# Altium footprint library Robert_.PcbLib: 95 footprints (part 4 of 6)
Each footprint in its own frame and in the unit in brackets; x right, y up, seen from the top. Pads: shape width x height; smd on the part's side, far side on the other; paste and mask are expansions set on the pad; w line width, h text height; cw(c..) or ccw(c..) is an arc to the next point about the centre after c.
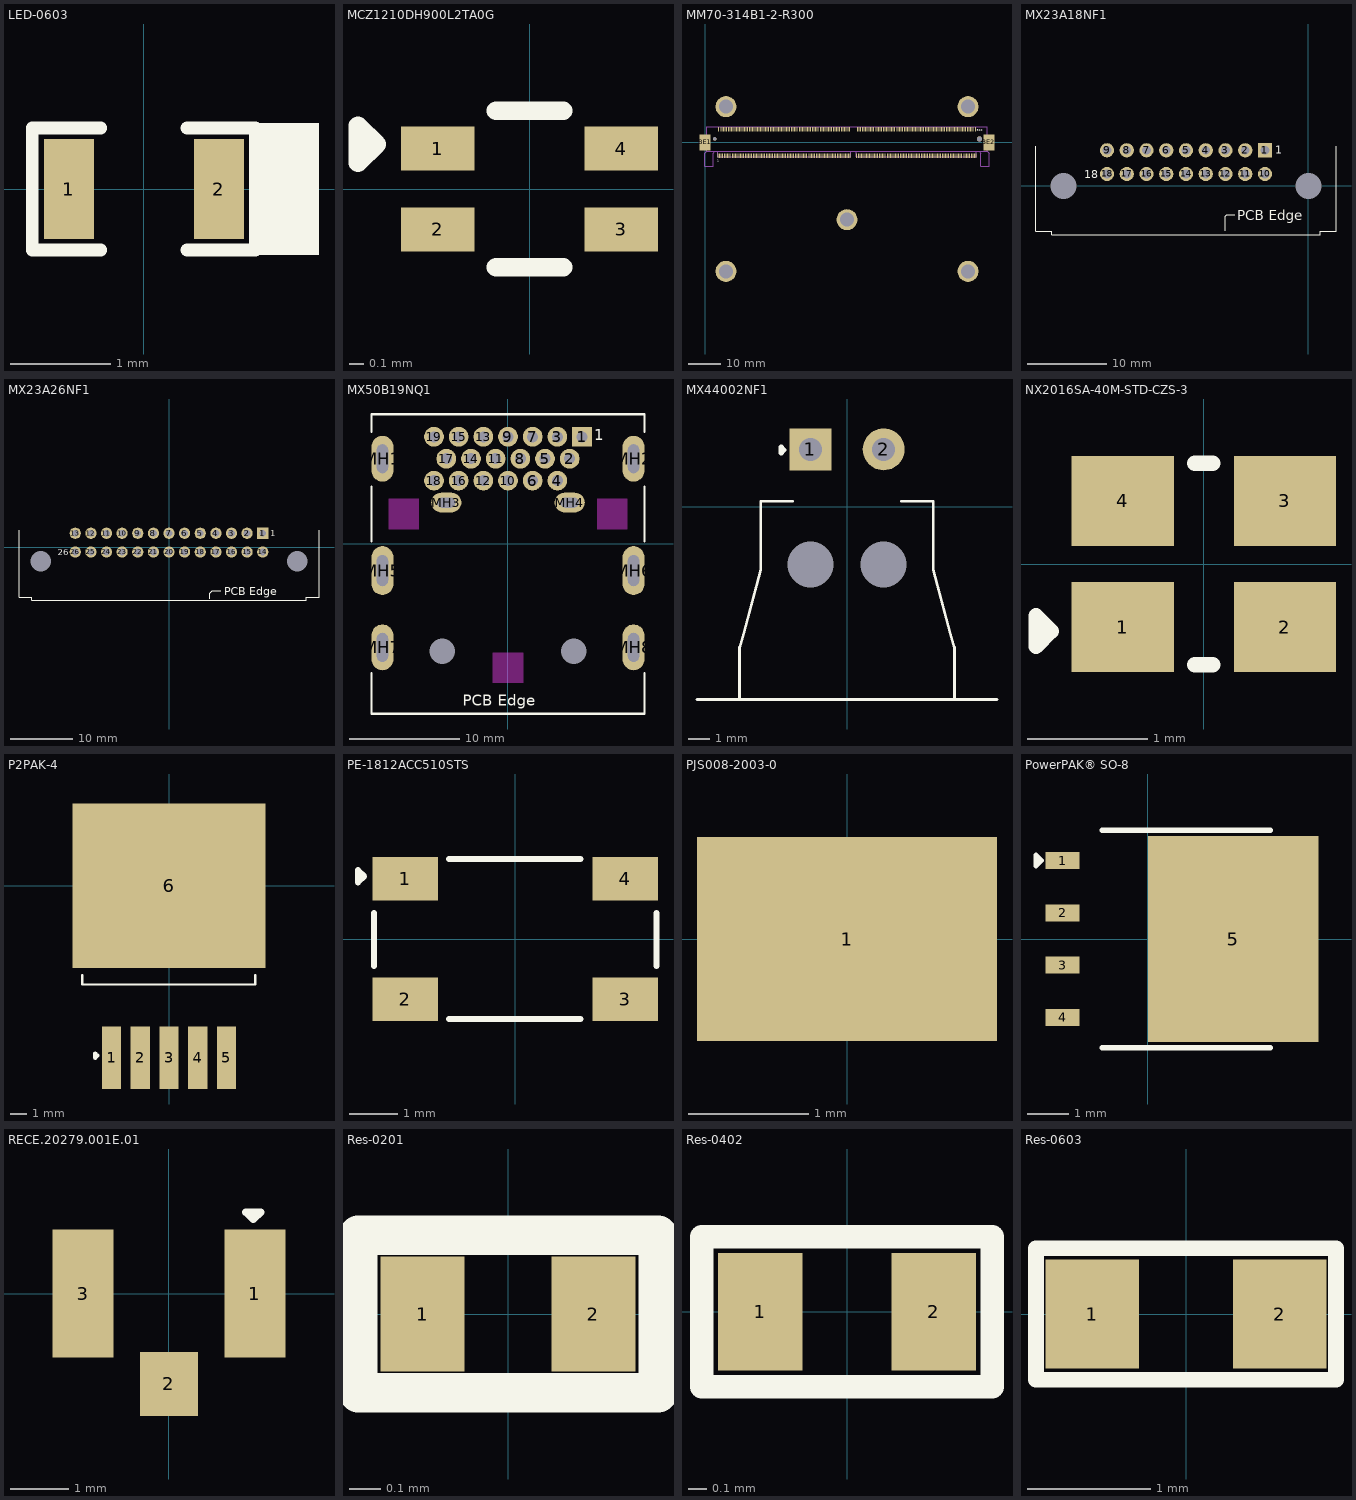
[diagram p3: the footprints below, top view; thin cyan lines are the x and y axes]

## LED-0603 [mm]
pads (2):
  rect 0.5x1 smd: 1(-0.75,0) 2(0.75,0)
Top Overlay:
  rectangle: 1.118,-0.66 1.753,0.66
  lines w0.127: -0.432,-0.61 -1.118,-0.61 -1.118,0.61 -0.432,0.61 ; 0.432,-0.61 1.118,-0.61 1.118,0.61 0.432,0.61
3D body "User Library-LED SMD0603.step": height 0.68, standoff 0, extent -0.825,-0.369 0.825,0.356

## MCZ1210DH900L2TA0G [mm]
pads (4):
  rect 0.5x0.3 smd: 1(-0.625,0.275) 2(-0.625,-0.275) 3(0.625,-0.275) 4(0.625,0.275)
Top Overlay:
  lines w0.127: -0.229,-0.533 0.229,-0.533 ; -0.229,0.533 0.229,0.533 ; -1.168,0.178 -1.168,0.432 -1.041,0.305 -1.168,0.178
3D body "MCZ1210DH900L2TA0G_TDK.step": height 0.51, standoff 0, extent -0.625,-0.495 0.625,0.495

## MM70-314B1-2-R300 [mm]
pads (323):
  rect 0.3x1.5 smd: 1(3.95,-4.1) 2(4.2,4.1) 3(4.45,-4.1) 4(4.7,4.1) 5(4.95,-4.1) 6(5.2,4.1) 7(5.45,-4.1) 8(5.7,4.1) 9(5.95,-4.1) 10(6.2,4.1) 11(6.45,-4.1) 12(6.7,4.1) 13(6.95,-4.1) 14(7.2,4.1) 15(7.45,-4.1) 16(7.7,4.1) 17(7.95,-4.1) 18(8.2,4.1) 19(8.45,-4.1) 20(8.7,4.1) 21(8.95,-4.1) 22(9.2,4.1) 23(9.45,-4.1) 24(9.7,4.1) 25(9.95,-4.1) 26(10.2,4.1) 27(10.45,-4.1) 28(10.7,4.1) 29(10.95,-4.1) 30(11.2,4.1) 31(11.45,-4.1) 32(11.7,4.1) 33(11.95,-4.1) 34(12.2,4.1) 35(12.45,-4.1) 36(12.7,4.1) 37(12.95,-4.1) 38(13.2,4.1) 39(13.45,-4.1) 40(13.7,4.1) 41(13.95,-4.1) 42(14.2,4.1) 43(14.45,-4.1) 44(14.7,4.1) 45(14.95,-4.1) 46(15.2,4.1) 47(15.45,-4.1) 48(15.7,4.1) 49(15.95,-4.1) 50(16.2,4.1) 51(16.45,-4.1) 52(16.7,4.1) 53(16.95,-4.1) 54(17.2,4.1) 55(17.45,-4.1) 56(17.7,4.1) 57(17.95,-4.1) 58(18.2,4.1) 59(18.45,-4.1) 60(18.7,4.1) 61(18.95,-4.1) 62(19.2,4.1) 63(19.45,-4.1) 64(19.7,4.1) 65(19.95,-4.1) 66(20.2,4.1) 67(20.45,-4.1) 68(20.7,4.1) 69(20.95,-4.1) 70(21.2,4.1) 71(21.45,-4.1) 72(21.7,4.1) 73(21.95,-4.1) 74(22.2,4.1) 75(22.45,-4.1) 76(22.7,4.1) 77(22.95,-4.1) 78(23.2,4.1) 79(23.45,-4.1) 80(23.7,4.1) 81(23.95,-4.1) 82(24.2,4.1) 83(24.45,-4.1) 84(24.7,4.1) 85(24.95,-4.1) 86(25.2,4.1) 87(25.45,-4.1) 88(25.7,4.1) 89(25.95,-4.1) 90(26.2,4.1) 91(26.45,-4.1) 92(26.7,4.1) 93(26.95,-4.1) 94(27.2,4.1) 95(27.45,-4.1) 96(27.7,4.1) 97(27.95,-4.1) 98(28.2,4.1) 99(28.45,-4.1) 100(28.7,4.1) 101(28.95,-4.1) 102(29.2,4.1) 103(29.45,-4.1) 104(29.7,4.1) 105(29.95,-4.1) 106(30.2,4.1) 107(30.45,-4.1) 108(30.7,4.1) 109(30.95,-4.1) 110(31.2,4.1) 111(31.45,-4.1) 112(31.7,4.1) 113(31.95,-4.1) 114(32.2,4.1) 115(32.45,-4.1) 116(32.7,4.1) 117(32.95,-4.1) 118(33.2,4.1) 119(33.45,-4.1) 120(33.7,4.1) 121(33.95,-4.1) 122(34.2,4.1) 123(34.45,-4.1) 124(34.7,4.1) 125(34.95,-4.1) 126(35.2,4.1) 127(35.45,-4.1) 128(35.7,4.1) 129(35.95,-4.1) 130(36.2,4.1) 131(36.45,-4.1) 132(36.7,4.1) 133(36.95,-4.1) 134(37.2,4.1) 135(37.45,-4.1) 136(37.7,4.1) 137(37.95,-4.1) 138(38.2,4.1) 139(38.45,-4.1) 140(38.7,4.1) 141(38.95,-4.1) 142(39.2,4.1) 143(39.45,-4.1) 144(39.7,4.1) 145(39.95,-4.1) 146(40.2,4.1) 147(40.45,-4.1) 148(40.7,4.1) 149(40.95,-4.1) 150(41.2,4.1) 151(41.45,-4.1) 152(41.7,4.1) 153(41.95,-4.1) 154(42.2,4.1) 155(42.45,-4.1) 156(42.7,4.1) 157(42.95,-4.1) 158(43.2,4.1) 159(43.45,-4.1) 160(43.7,4.1) 161(43.95,-4.1) 162(44.2,4.1) 163(44.45,-4.1) 164(44.7,4.1) 165(44.95,-4.1) 173(46.95,-4.1) 174(47.2,4.1) 175(47.45,-4.1) 176(47.7,4.1) 177(47.95,-4.1) 178(48.2,4.1) 179(48.45,-4.1) 180(48.7,4.1) 181(48.95,-4.1) 182(49.2,4.1) 183(49.45,-4.1) 184(49.7,4.1) 185(49.95,-4.1) 186(50.2,4.1) 187(50.45,-4.1) 188(50.7,4.1) 189(50.95,-4.1) 190(51.2,4.1) 191(51.45,-4.1) 192(51.7,4.1) 193(51.95,-4.1) 194(52.2,4.1) 195(52.45,-4.1) 196(52.7,4.1) 197(52.95,-4.1) 198(53.2,4.1) 199(53.45,-4.1) 200(53.7,4.1) 201(53.95,-4.1) 202(54.2,4.1) 203(54.45,-4.1) 204(54.7,4.1) 205(54.95,-4.1) 206(55.2,4.1) 207(55.45,-4.1) 208(55.7,4.1) 209(55.95,-4.1) 210(56.2,4.1) 211(56.45,-4.1) 212(56.7,4.1) 213(56.95,-4.1) 214(57.2,4.1) 215(57.45,-4.1) 216(57.7,4.1) 217(57.95,-4.1) 218(58.2,4.1) 219(58.45,-4.1) 220(58.7,4.1) 221(58.95,-4.1) 222(59.2,4.1) 223(59.45,-4.1) 224(59.7,4.1) 225(59.95,-4.1) 226(60.2,4.1) 227(60.45,-4.1) 228(60.7,4.1) 229(60.95,-4.1) 230(61.2,4.1) 231(61.45,-4.1) 232(61.7,4.1) 233(61.95,-4.1) 234(62.2,4.1) 235(62.45,-4.1) 236(62.7,4.1) 237(62.95,-4.1) 238(63.2,4.1) 239(63.45,-4.1) 240(63.7,4.1) 241(63.95,-4.1) 242(64.2,4.1) 243(64.45,-4.1) 244(64.7,4.1) 245(64.95,-4.1) 246(65.2,4.1) 247(65.45,-4.1) 248(65.7,4.1) 249(65.95,-4.1) 250(66.2,4.1) 251(66.45,-4.1) 252(66.7,4.1) 253(66.95,-4.1) 254(67.2,4.1) 255(67.45,-4.1) 256(67.7,4.1) 257(67.95,-4.1) 258(68.2,4.1) 259(68.45,-4.1) 260(68.7,4.1) 261(68.95,-4.1) 262(69.2,4.1) 263(69.45,-4.1) 264(69.7,4.1) 265(69.95,-4.1) 266(70.2,4.1) 267(70.45,-4.1) 268(70.7,4.1) 269(70.95,-4.1) 270(71.2,4.1) 271(71.45,-4.1) 272(71.7,4.1) 273(71.95,-4.1) 274(72.2,4.1) 275(72.45,-4.1) 276(72.7,4.1) 277(72.95,-4.1) 278(73.2,4.1) 279(73.45,-4.1) 280(73.7,4.1) 281(73.95,-4.1) 282(74.2,4.1) 283(74.45,-4.1) 284(74.7,4.1) 285(74.95,-4.1) 286(75.2,4.1) 287(75.45,-4.1) 288(75.7,4.1) 289(75.95,-4.1) 290(76.2,4.1) 291(76.45,-4.1) 292(76.7,4.1) 293(76.95,-4.1) 294(77.2,4.1) 295(77.45,-4.1) 296(77.7,4.1) 297(77.95,-4.1) 298(78.2,4.1) 299(78.45,-4.1) 300(78.7,4.1) 301(78.95,-4.1) 302(79.2,4.1) 303(79.45,-4.1) 304(79.7,4.1) 305(79.95,-4.1) 306(80.2,4.1) 307(80.45,-4.1) 308(80.7,4.1) 309(80.95,-4.1) 310(81.2,4.1) 311(81.45,-4.1) 312(81.7,4.1) 313(81.95,-4.1) 314(82.2,4.1) 315(82.45,-4.1) 316(82.7,4.1) 317(82.95,-4.1) 318(83.2,4.1) 319(83.45,-4.1) 320(83.7,4.1) 321(83.95,-4.1)
  rect 3.3x5 smd: BE1(0,0) BE2(87.9,0)
  round 1.1 hole 1.1 unplated: ""(2.95,1.1)
  round 6.5 hole 4.33: ""(6.45,-39.9) ""(6.45,11.1) ""(43.95,-23.9) ""(81.45,-39.9) ""(81.45,11.1)
  round 1.6 hole 1.6 unplated: ""(84.95,1.1)
Top Overlay:
  text "320" at 84.198,3.553 h0.7
  text "1" at 3.807,-6.023 h0.7
Mechanical 3:
  lines w0.1: 3.05,-2.65 2.55,-3.35 2.55,-7.35 -0.05,-7.35 -0.05,-3.35 0.45,-2.65 ; 3.85,-2.65 3.85,-4.45 45.05,-4.45 45.05,-2.65 ; 46.85,-2.65 46.85,-4.45 84.05,-4.45 84.05,-2.65 ; 84.85,-2.65 85.35,-3.35 85.35,-7.35 87.95,-7.35 87.95,-3.35 87.45,-2.65 ; 0.45,-2.65 0.45,-2 -1,-2 -1,2 0.45,2 0.45,4.85 87.45,4.85 87.45,2 88.9,2 88.9,-2 87.45,-2 87.45,-2.65 ; 0.45,-2.65 87.45,-2.65
3D body "Fastner8mm.STEP": height 8.02, standoff -1.51, extent 3.659,8.332 9.219,13.868
3D body "Fastner8mm.STEP": height 8.02, standoff -1.51, extent 78.659,8.332 84.219,13.868
3D body "Fastner3mm.STEP": height 3.02, standoff -1.51, extent 41.159,-26.668 46.719,-21.132
3D body "Fastner3mm.STEP": height 3.02, standoff -1.51, extent 78.659,-42.668 84.219,-37.132
3D body "Fastner3mm.STEP": height 3.02, standoff -1.51, extent 3.659,-42.668 9.219,-37.132
3D body "SJ121699_MM70-314B1-2_v01_JAE_Proprietary.STEP": height 6.71, standoff -0.99, extent -1,-7.35 88.9,4.85

## MX23A18NF1 [mm]
pads (20):
  rect 1.8x1.8 hole 1.1: 1(-5.5,4.5)
  round 1.8 hole 1.1: 2(-8,4.5) 3(-10.5,4.5) 4(-13,4.5) 5(-15.5,4.5) 6(-18,4.5) 7(-20.5,4.5) 8(-23,4.5) 9(-25.5,4.5) 10(-5.5,1.5) 11(-8,1.5) 12(-10.5,1.5) 13(-13,1.5) 14(-15.5,1.5) 15(-18,1.5) 16(-20.5,1.5) 17(-23,1.5) 18(-25.5,1.5)
  round 0 hole 3.3 unplated: ""(-31,0) ""(0,0)
Top Overlay:
  lines w0.127: -34.5,5 -34.5,-5.733 -32.5,-5.733 -32.5,-6.203 1.499,-6.203 ; -10.541,-5.664 -10.541,-3.861 -10.338,-3.658 -9.347,-3.658 ; 1.5,-6.203 1.5,-5.733 3.5,-5.733 3.5,5
  text "PCB Edge" at -8.992,-4.369 h1.27
  text "1" at -4.166,4.064 h1
  text "18" at -28.372,0.991 h1
3D body "K3D-MX23A18NF1-R5 JAE Connector Division Proprietary.STEP": height 18.45, standoff -2.95, extent -34.495,-33.298 3.505,5.002

## MX23A26NF1 [mm]
pads (28):
  rect 1.8x1.8 hole 1.1: 1(15,2.25)
  round 1.8 hole 1.1: 2(12.5,2.25) 3(10,2.25) 4(7.5,2.25) 5(5,2.25) 6(2.5,2.25) 7(0,2.25) 8(-2.5,2.25) 9(-5,2.25) 10(-7.5,2.25) 11(-10,2.25) 12(-12.5,2.25) 13(-15,2.25) 14(15,-0.75) 15(12.5,-0.75) 16(10,-0.75) 17(7.5,-0.75) 18(5,-0.75) 19(2.5,-0.75) 20(0,-0.75) 21(-2.5,-0.75) 22(-5,-0.75) 23(-7.5,-0.75) 24(-10,-0.75) 25(-12.5,-0.75) 26(-15,-0.75)
  round 0 hole 3.3 unplated: ""(-20.5,-2.25) ""(20.5,-2.25)
Top Overlay:
  lines w0.127: -24,2.75 -24,-8.009 -22,-8.009 -22,-8.491 22,-8.491 22,-8.009 24,-8.009 24,2.75 ; 6.553,-8.255 6.553,-7.315 6.909,-6.96 8.306,-6.96
  text "PCB Edge" at 8.865,-7.671 h1.27
  text "1" at 16.231,1.778 h1
  text "26" at -17.831,-1.295 h1
3D body "K3D-MX23A26NF1-R5 JAE Connector Division Proprietary.STEP": height 18.4, standoff -3, extent -23.975,-35.531 24.025,2.769

## MX50B19NQ1 [mm]
pads (29):
  rect 1.8x1.8 hole 1: 1(6.75,9.775)
  round 1.8 hole 1: 2(5.625,7.775) 3(4.5,9.775) 4(4.5,5.775) 5(3.375,7.775) 6(2.25,5.775) 7(2.25,9.775) 8(1.125,7.775) 9(0,9.775) 10(0,5.775) 11(-1.125,7.775) 12(-2.25,5.775) 13(-2.25,9.775) 14(-3.375,7.775) 15(-4.5,9.775) 16(-4.5,5.775) 17(-5.625,7.775) 18(-6.75,5.775) 19(-6.75,9.775)
  oval 2x4.185 hole 1.02 slot 2.62 at 90 deg: MH1(-11.45,7.775) MH2(11.45,7.775) MH7(-11.45,-9.425) MH8(11.45,-9.425)
  oval 2.76x1.8 hole 0.92 slot 1.62 at 0 deg: MH3(-5.625,3.775) MH4(5.625,3.775)
  oval 2x4.455 hole 1.02 slot 2.82 at 90 deg: MH5(-11.45,-2.425) MH6(11.45,-2.425)
  round 0 hole 2.3 unplated: MH9(-6,-9.775) MH10(6,-9.775)
Top Overlay:
  lines w0.2: -12.45,-11.775 -12.45,-15.475 12.45,-15.475 12.45,-11.775 ; -12.45,0.225 -12.45,5.225 ; -12.45,10.225 -12.45,11.825 12.45,11.825 12.45,10.225 ; 12.45,0.225 12.45,5.225
  text "PCB Edge" at -4.14,-14.754 h1
  text "1" at 7.887,9.477 h1
Keep-Out Layer:
  rectangle: -1.397,-12.675 1.403,-9.875
  rectangle: 8.103,1.325 10.903,4.125
  rectangle: -10.897,1.325 -8.097,4.125
3D body "MX50B19NQ1.STEP": height 12.45, standoff -3.35, extent -12.454,-19.84 12.446,11.76

## MX44002NF1 [mm]
pads (4):
  rect 2x2 hole 1.1: 1(-1.75,2.75)
  round 2 hole 1.1: 2(1.75,2.75)
  round 0 hole 2.2 unplated: MH(-1.75,-2.75) MH(1.75,-2.75)
Top Overlay:
  lines w0.127: -7.163,-9.195 7.163,-9.195 ; -5.131,-9.195 -5.131,-6.706 -4.928,-6.045 -4.115,-2.997 -4.115,0.279 -2.591,0.279 ; 2.591,0.279 4.115,0.279 4.115,-2.997 4.928,-6.045 5.131,-6.706 5.131,-9.195
  lines w0.254: -3.147,2.596 -3.147,2.85 -3.02,2.723 -3.147,2.596
3D body "K3D-MX44002NF1-V5_JAE_Proprietary.step": height 9.9, standoff -3.1, extent -7.125,-23.047 7.175,3.073

## NX2016SA-40M-STD-CZS-3 [mm]
pads (4):
  rect 0.85x0.75 smd: 1(-0.675,-0.525) 2(0.675,-0.525) 3(0.675,0.525) 4(-0.675,0.525)
Top Overlay:
  lines w0.127: -0.076,-0.838 0.074,-0.838 ; -0.076,0.838 0.074,0.838 ; -1.397,-0.686 -1.397,-0.432 -1.27,-0.559 -1.397,-0.686
3D body "NX2016SA-40M-STD-CZS-3--3DModel-STEP-510211.STEP": height 0.5, standoff 0, extent -1,-0.8 1,0.8

## P2PAK-4 [mm]
pads (6):
  rect 1.15x3.7 smd: 1(-3.4,-10.175) 2(-1.7,-10.175) 3(0,-10.175) 4(1.7,-10.175) 5(3.4,-10.175)
  rect 11.44x9.75 smd: 6(0,0)
Top Overlay:
  lines w0.127: -5.131,-5.283 -5.131,-5.842 5.105,-5.842 5.105,-5.283
  lines w0.254: -4.369,-10.175 -4.242,-10.048 -4.369,-9.921 -4.369,-10.175
3D body "KTT0005B.stp": height 4.69, standoff -0.03, extent -5.08,-10.325 5.08,3.975

## PE-1812ACC510STS [mm]
pads (4):
  rect 1.35x0.9 smd: 1(-2.275,1.25) 2(-2.275,-1.25) 3(2.275,-1.25) 4(2.275,1.25)
Top Overlay:
  lines w0.127: -2.921,-0.559 -2.921,0.533 ; -1.372,-1.651 1.346,-1.651 ; -1.372,1.651 1.346,1.651 ; 2.921,-0.559 2.921,0.533 ; -3.251,1.168 -3.251,1.422 -3.124,1.295 -3.251,1.168
3D body "PE-1812ACC510STS.stp": height 3.1, standoff 0, extent -2.86,-1.61 2.86,1.61

## PJS008-2003-0 [mm]
pads (1):
  rect 2.5x1.7 smd: 1(0,0)

## PowerPAK® SO-8 [mm]
pads (5):
  rect 0.822x0.41 smd mask+0.055: 1(-2.07,1.905) 2(-2.07,0.635) 3(-2.07,-0.635) 4(-2.07,-1.905)
  rect 4.14x5 smd mask+0.055: 5(2.07,0)
Top Overlay:
  lines w0.127: -1.118,-2.642 2.972,-2.642 ; -1.118,2.642 2.972,2.642 ; -2.718,1.778 -2.718,2.032 -2.591,1.905 -2.718,1.778
3D body "SQJ422EP-T1_GE3.STEP": height 1.24, standoff -0.03, extent -2.288,-2.565 3.862,2.565

## RECE.20279.001E.01 [mm]
pads (3):
  rect 1.05x2.2 smd: 1(1.475,0) 3(-1.475,0)
  rect 1x1.1 smd: 2(0,-1.55)
Top Overlay:
  lines w0.127: 1.321,1.397 1.448,1.27 1.575,1.397 1.321,1.397

## Res-0201 [mm]
pads (2):
  rect 0.27x0.37 smd mask+0.055: 1(-0.275,0) 2(0.275,0)
Top Overlay:
  lines w0.127: -0.483,-0.254 0.483,-0.254 0.483,0.254 -0.483,0.254 -0.483,-0.254
3D body "User Library-0201(0603M) Res.step": height 0.29, standoff -0.02, extent -0.305,-0.152 0.305,0.153

## Res-0402 [mil]
pads (2):
  rect 18x25 smd mask+2.17: 1(-18.5,0) 2(18.5,0)
Top Overlay:
  lines w0.13: -32,-17 32,-17
  lines w5: -31,-16 31,-16 31,16 -31,16 -31,-16
3D body "User Library-RES_1005-0402.step": height 16.14, standoff 0, extent -22.63,-10.82 22.64,10.83

## Res-0603 [mil]
pads (2):
  rect 30x35 smd: 1(-30,0) 2(30,0)
Top Overlay:
  lines w5: -48,-21 48,-21 48,21 -48,21 -48,-21
3D body "User Library-RESC1608X05N.step": height 17.76, standoff 0, extent -30.52,-16.74 30.51,16.73